# Altium integrated library B3F-1000.IntLib: 1 symbol
Pins are listed as number, name and electrical type; pins without a type are passive.

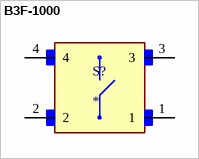
[diagram p0: symbol B3F-1000]

## B3F-1000
designator S?
Switch Tactile N.O. SPST Flat Round Button PC Pins 0.05A 24VDC 1000000Cycles 0.98N Thru-Hole Bag; MF: Omron; MP: B3F1000; SnapEDA_Link: https://www.snapeda.com/parts/B3F1000/Omron/view-part/?ref=snap; Package: None; Value: *; Check_prices: https://www.snapeda.com/parts/B3F1000/Omron/view-part/?ref=eda
footprint SW_B3F-1000
pins: 1, 2, 3, 4